# Altium footprint library DS3231SNTR.PcbLib: 3 footprints
Each footprint in its own frame and in the unit in brackets; x right, y up, seen from the top. Pads: shape width x height; smd on the part's side, far side on the other; paste and mask are expansions set on the pad; w line width, h text height; cw(c..) or ccw(c..) is an arc to the next point about the centre after c.
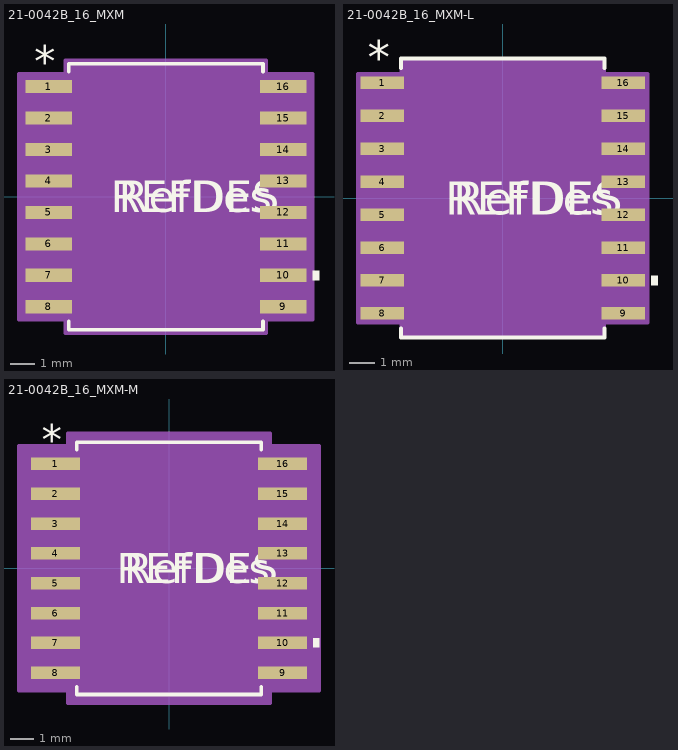
[diagram p0: the footprints below, top view; thin cyan lines are the x and y axes]

## 21-0042B_16_MXM [mil]
pads (16):
  rect 74x21 smd paste+0 mask+0: 1(-186.5,175) 2(-186.5,125) 3(-186.5,75) 4(-186.5,25) 5(-186.5,-25) 6(-186.5,-75) 7(-186.5,-125) 8(-186.5,-175) 9(186.5,-175) 10(186.5,-125) 11(186.5,-75) 12(186.5,-25) 13(186.5,25) 14(186.5,75) 15(186.5,125) 16(186.5,175)
Top Overlay:
  region: 233.5,-117.5 243.5,-117.5 243.5,-132.5 233.5,-132.5
  lines w6: -154.5,-198.6 -154.5,-211.5 154.5,-211.5 154.5,-198.6 ; -154.5,198.6 -154.5,211.5 154.5,211.5 154.5,198.6
  text "REFDES" at -87.5,-25 h50
  text "*" at -209,191 h50
  text "RefDes" at -75,-25 h50
Mechanical 13:
  lines w0: -12,206.5 ccw(c0,206.5) 12,206.5
  lines w1: -209.5,-184.5 -209.5,-165.5 -149.5,-165.5 -149.5,-184.5 -209.5,-184.5 ; -209.5,-134.5 -209.5,-115.5 -149.5,-115.5 -149.5,-134.5 -209.5,-134.5 ; -209.5,-84.5 -209.5,-65.5 -149.5,-65.5 -149.5,-84.5 -209.5,-84.5 ; -209.5,-34.5 -209.5,-15.5 -149.5,-15.5 -149.5,-34.5 -209.5,-34.5 ; -209.5,15.5 -209.5,34.5 -149.5,34.5 -149.5,15.5 -209.5,15.5 ; -209.5,65.5 -209.5,84.5 -149.5,84.5 -149.5,65.5 -209.5,65.5 ; -209.5,115.5 -209.5,134.5 -149.5,134.5 -149.5,115.5 -209.5,115.5 ; -209.5,165.5 -209.5,184.5 -149.5,184.5 -149.5,165.5 -209.5,165.5 ; -149.5,-206.5 149.5,-206.5 149.5,206.5 -149.5,206.5 -149.5,-206.5 ; 149.5,-184.5 149.5,-165.5 209.5,-165.5 209.5,-184.5 149.5,-184.5 ; 149.5,-134.5 149.5,-115.5 209.5,-115.5 209.5,-134.5 149.5,-134.5 ; 149.5,-84.5 149.5,-65.5 209.5,-65.5 209.5,-84.5 149.5,-84.5 ; 149.5,-34.5 149.5,-15.5 209.5,-15.5 209.5,-34.5 149.5,-34.5 ; 149.5,15.5 149.5,34.5 209.5,34.5 209.5,15.5 149.5,15.5 ; 149.5,65.5 149.5,84.5 209.5,84.5 209.5,65.5 149.5,65.5 ; 149.5,115.5 149.5,134.5 209.5,134.5 209.5,115.5 149.5,115.5 ; 149.5,165.5 149.5,184.5 209.5,184.5 209.5,165.5 149.5,165.5
  text "*" at -147,153.5 h50
  text "RefDes2" at -87.5,-25 h50
Mechanical 15:
  region: -159.5,-195.5 -233.5,-195.5 -233.5,195.5 -159.5,195.5 -159.5,216.5 159.5,216.5 159.5,195.5 233.5,195.5 233.5,-195.5 159.5,-195.5 159.5,-216.5 -159.5,-216.5
  lines w6: -233.5,-195.5 -233.5,195.5 -159.5,195.5 -159.5,216.5 159.5,216.5 159.5,195.5 233.5,195.5 233.5,-195.5 159.5,-195.5 159.5,-216.5 -159.5,-216.5 -159.5,-195.5 -233.5,-195.5
3D body "21-0042B_16_MXM.step": height 104.09, standoff 0, extent -209.49,-206.5 209.49,206.5

## 21-0042B_16_MXM-L [mil]
pads (16):
  rect 66x19 smd paste+0 mask+0: 1(-182.5,175) 2(-182.5,125) 3(-182.5,75) 4(-182.5,25) 5(-182.5,-25) 6(-182.5,-75) 7(-182.5,-125) 8(-182.5,-175) 9(182.5,-175) 10(182.5,-125) 11(182.5,-75) 12(182.5,-25) 13(182.5,25) 14(182.5,75) 15(182.5,125) 16(182.5,175)
Top Overlay:
  region: 225.5,-117.5 235.5,-117.5 235.5,-132.5 225.5,-132.5
  lines w6: -154.5,-197.6 -154.5,-211.5 154.5,-211.5 154.5,-197.6 ; -154.5,197.6 -154.5,211.5 154.5,211.5 154.5,197.6
  text "REFDES" at -87.5,-25 h50
  text "*" at -205,189 h50
  text "RefDes" at -75,-25 h50
Mechanical 13:
  lines w0: -12,206.5 ccw(c0,206.5) 12,206.5
  lines w1: -209.5,-184.5 -209.5,-165.5 -149.5,-165.5 -149.5,-184.5 -209.5,-184.5 ; -209.5,-134.5 -209.5,-115.5 -149.5,-115.5 -149.5,-134.5 -209.5,-134.5 ; -209.5,-84.5 -209.5,-65.5 -149.5,-65.5 -149.5,-84.5 -209.5,-84.5 ; -209.5,-34.5 -209.5,-15.5 -149.5,-15.5 -149.5,-34.5 -209.5,-34.5 ; -209.5,15.5 -209.5,34.5 -149.5,34.5 -149.5,15.5 -209.5,15.5 ; -209.5,65.5 -209.5,84.5 -149.5,84.5 -149.5,65.5 -209.5,65.5 ; -209.5,115.5 -209.5,134.5 -149.5,134.5 -149.5,115.5 -209.5,115.5 ; -209.5,165.5 -209.5,184.5 -149.5,184.5 -149.5,165.5 -209.5,165.5 ; -149.5,-206.5 149.5,-206.5 149.5,206.5 -149.5,206.5 -149.5,-206.5 ; 149.5,-184.5 149.5,-165.5 209.5,-165.5 209.5,-184.5 149.5,-184.5 ; 149.5,-134.5 149.5,-115.5 209.5,-115.5 209.5,-134.5 149.5,-134.5 ; 149.5,-84.5 149.5,-65.5 209.5,-65.5 209.5,-84.5 149.5,-84.5 ; 149.5,-34.5 149.5,-15.5 209.5,-15.5 209.5,-34.5 149.5,-34.5 ; 149.5,15.5 149.5,34.5 209.5,34.5 209.5,15.5 149.5,15.5 ; 149.5,65.5 149.5,84.5 209.5,84.5 209.5,65.5 149.5,65.5 ; 149.5,115.5 149.5,134.5 209.5,134.5 209.5,115.5 149.5,115.5 ; 149.5,165.5 149.5,184.5 209.5,184.5 209.5,165.5 149.5,165.5
  text "*" at -147,153.5 h50
  text "RefDes2" at -87.5,-25 h50
Mechanical 15:
  region: -153.5,-188.5 -219.5,-188.5 -219.5,188.5 -153.5,188.5 -153.5,210.5 153.5,210.5 153.5,188.5 219.5,188.5 219.5,-188.5 153.5,-188.5 153.5,-210.5 -153.5,-210.5
  lines w6: -219.5,-188.5 -219.5,188.5 -153.5,188.5 -153.5,210.5 153.5,210.5 153.5,188.5 219.5,188.5 219.5,-188.5 153.5,-188.5 153.5,-210.5 -153.5,-210.5 -153.5,-188.5 -219.5,-188.5
3D body "21-0042B_16_MXM.step": height 104.09, standoff 0, extent -209.49,-206.5 209.49,206.5

## 21-0042B_16_MXM-M [mil]
pads (16):
  rect 82x21 smd paste+0 mask+0: 1(-190.5,175) 2(-190.5,125) 3(-190.5,75) 4(-190.5,25) 5(-190.5,-25) 6(-190.5,-75) 7(-190.5,-125) 8(-190.5,-175) 9(190.5,-175) 10(190.5,-125) 11(190.5,-75) 12(190.5,-25) 13(190.5,25) 14(190.5,75) 15(190.5,125) 16(190.5,175)
Top Overlay:
  region: 241.5,-117.5 251.5,-117.5 251.5,-132.5 241.5,-132.5
  lines w6: -154.5,-198.6 -154.5,-211.5 154.5,-211.5 154.5,-198.6 ; -154.5,198.6 -154.5,211.5 154.5,211.5 154.5,198.6
  text "REFDES" at -87.5,-25 h50
  text "*" at -213,191 h50
  text "RefDes" at -75,-25 h50
Mechanical 13:
  lines w0: -12,206.5 ccw(c0,206.5) 12,206.5
  lines w1: -209.5,-184.5 -209.5,-165.5 -149.5,-165.5 -149.5,-184.5 -209.5,-184.5 ; -209.5,-134.5 -209.5,-115.5 -149.5,-115.5 -149.5,-134.5 -209.5,-134.5 ; -209.5,-84.5 -209.5,-65.5 -149.5,-65.5 -149.5,-84.5 -209.5,-84.5 ; -209.5,-34.5 -209.5,-15.5 -149.5,-15.5 -149.5,-34.5 -209.5,-34.5 ; -209.5,15.5 -209.5,34.5 -149.5,34.5 -149.5,15.5 -209.5,15.5 ; -209.5,65.5 -209.5,84.5 -149.5,84.5 -149.5,65.5 -209.5,65.5 ; -209.5,115.5 -209.5,134.5 -149.5,134.5 -149.5,115.5 -209.5,115.5 ; -209.5,165.5 -209.5,184.5 -149.5,184.5 -149.5,165.5 -209.5,165.5 ; -149.5,-206.5 149.5,-206.5 149.5,206.5 -149.5,206.5 -149.5,-206.5 ; 149.5,-184.5 149.5,-165.5 209.5,-165.5 209.5,-184.5 149.5,-184.5 ; 149.5,-134.5 149.5,-115.5 209.5,-115.5 209.5,-134.5 149.5,-134.5 ; 149.5,-84.5 149.5,-65.5 209.5,-65.5 209.5,-84.5 149.5,-84.5 ; 149.5,-34.5 149.5,-15.5 209.5,-15.5 209.5,-34.5 149.5,-34.5 ; 149.5,15.5 149.5,34.5 209.5,34.5 209.5,15.5 149.5,15.5 ; 149.5,65.5 149.5,84.5 209.5,84.5 209.5,65.5 149.5,65.5 ; 149.5,115.5 149.5,134.5 209.5,134.5 209.5,115.5 149.5,115.5 ; 149.5,165.5 149.5,184.5 209.5,184.5 209.5,165.5 149.5,165.5
  text "*" at -147,153.5 h50
  text "RefDes2" at -87.5,-25 h50
Mechanical 15:
  region: -169.5,-205.5 -251.5,-205.5 -251.5,205.5 -169.5,205.5 -169.5,226.5 169.5,226.5 169.5,205.5 251.5,205.5 251.5,-205.5 169.5,-205.5 169.5,-226.5 -169.5,-226.5
  lines w6: -251.5,-205.5 -251.5,205.5 -169.5,205.5 -169.5,226.5 169.5,226.5 169.5,205.5 251.5,205.5 251.5,-205.5 169.5,-205.5 169.5,-226.5 -169.5,-226.5 -169.5,-205.5 -251.5,-205.5
3D body "21-0042B_16_MXM.step": height 104.09, standoff 0, extent -209.49,-206.5 209.49,206.5